# EAGLE library part SYN-TQFP32-MCU (library synthetic_all)
SYN-TQFP32-MCU Synthetic 8-bit MCU TQFP-32 Source: JLCEDA/EasyEDA Official Library (https://lceda.cn/ , https://easyeda.com). Copyright of the library data belongs to JLCEDA/EasyEDA.
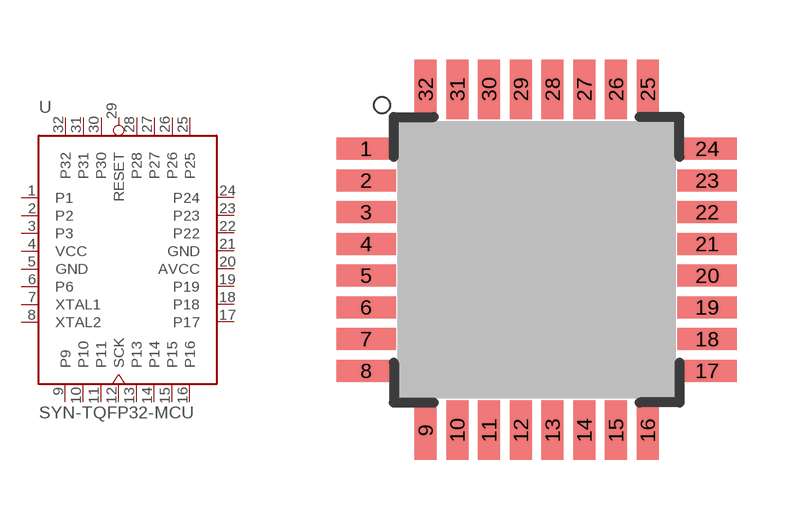
[diagram p6: symbol with the pads of SYN-TQFP-32; footprint SYN-TQFP-32]

Designator prefix U

## SYN-TQFP32-MCU (JLCPCB_CLASS: Basic Part; LCSC_PACKAGE: SYN-TQFP-32; LCSC_PART: C9000007; MANUFACTURER: SYN-Maker; MPN: SYN-TQFP32-MCU; SOURCE: Source: JLCEDA/EasyEDA Official Library (https://lceda.cn/ , https://easyeda.com). Copyright of the library data belongs to JLCEDA/EasyEDA.)  [SYN-TQFP-32]
1  P1
2  P2
3  P3
4  VCC  pwr
5  GND  pwr
6  P6
7  XTAL1  in
8  XTAL2  out
9  P9
10  P10
11  P11
12  SCK  in
13  P13
14  P14
15  P15
16  P16
17  P17
18  P18
19  P19
20  AVCC  pwr
21  GND  pwr
22  P22
23  P23
24  P24
25  P25
26  P26
27  P27
28  P28
29  RESET  in
30  P30
31  P31
32  P32

## Footprint SYN-TQFP-32 (pad centres in mm)
SYN-TQFP-32
smd 1.5 x 0.55: 1 -4.3,2.8; 2 -4.3,2; 3 -4.3,1.2; 4 -4.3,0.4; 5 -4.3,-0.4; 6 -4.3,-1.2; 7 -4.3,-2; 8 -4.3,-2.8; 17 4.3,-2.8; 18 4.3,-2; 19 4.3,-1.2; 20 4.3,-0.4; 21 4.3,0.4; 22 4.3,1.2; 23 4.3,2; 24 4.3,2.8
smd 0.55 x 1.5: 9 -2.8,-4.3; 10 -2,-4.3; 11 -1.2,-4.3; 12 -0.4,-4.3; 13 0.4,-4.3; 14 1.2,-4.3; 15 2,-4.3; 16 2.8,-4.3; 25 2.8,4.3; 26 2,4.3; 27 1.2,4.3; 28 0.4,4.3; 29 -0.4,4.3; 30 -1.2,4.3; 31 -2,4.3; 32 -2.8,4.3